# Altium schematic symbol library Treebeard_Passives.SchLib: 5 symbols
Pins are listed as number, name and electrical type; pins without a type are passive.

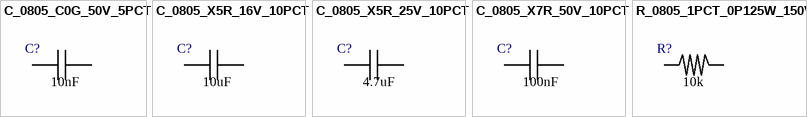
[diagram p0: symbols C_0805_C0G_50V_5PCT to R_0805_1PCT_0P125W_150V]

## C_0805_C0G_50V_5PCT
designator C?, comment Capacitance: 10nF  (hidden comment: 10nF 5% 50V C0G/NP0 0805 MLCC)
Generic 0805 MLCC preset; edit Capacitance only, always with its F (10pF, 1nF, 1uF); Procurement Class: Commodity - freeze LCSC Part # before ordering; Do Not Substitute: No; Component Type: Capacitor; Tolerance: 5%; Voltage Rating: 50V; Dielectric: C0G/NP0; Technology: MLCC; Package: 0805 (2012 Metric)
footprint TB_C_0805_2012M (Treebeard controlled 0805 house footprint)
pins: 1, 2

## C_0805_X5R_16V_10PCT
designator C?, comment Capacitance: 10uF  (hidden comment: 10uF 10% 16V X5R 0805 MLCC)
Generic 0805 MLCC preset; edit Capacitance only, always with its F (10pF, 1nF, 1uF); Procurement Class: Commodity - freeze LCSC Part # before ordering; Do Not Substitute: No; Component Type: Capacitor; Tolerance: 10%; Voltage Rating: 16V; Dielectric: X5R; Technology: MLCC; Package: 0805 (2012 Metric)
footprint TB_C_0805_2012M (Treebeard controlled 0805 house footprint)
pins: 1, 2

## C_0805_X5R_25V_10PCT
designator C?, comment Capacitance: 4.7uF  (hidden comment: 4.7uF 10% 25V X5R 0805 MLCC)
Generic 0805 MLCC preset; edit Capacitance only, always with its F (10pF, 1nF, 1uF); Procurement Class: Commodity - freeze LCSC Part # before ordering; Do Not Substitute: No; Component Type: Capacitor; Tolerance: 10%; Voltage Rating: 25V; Dielectric: X5R; Technology: MLCC; Package: 0805 (2012 Metric)
footprint TB_C_0805_2012M (Treebeard controlled 0805 house footprint)
pins: 1, 2

## C_0805_X7R_50V_10PCT
designator C?, comment Capacitance: 100nF  (hidden comment: 100nF 10% 50V X7R 0805 MLCC)
Generic 0805 MLCC preset; edit Capacitance only, always with its F (10pF, 1nF, 1uF); Procurement Class: Commodity - freeze LCSC Part # before ordering; Do Not Substitute: No; Component Type: Capacitor; Tolerance: 10%; Voltage Rating: 50V; Dielectric: X7R; Technology: MLCC; Package: 0805 (2012 Metric)
footprint TB_C_0805_2012M (Treebeard controlled 0805 house footprint)
pins: 1, 2

## R_0805_1PCT_0P125W_150V
designator R?, comment Resistance: 10k  (hidden comment: 10k ohm 1% 0.125W 150V 100ppm/C 0805 thick-film resistor)
Generic 0805 thick-film resistor; edit Resistance only for normal use; Procurement Class: Commodity - freeze LCSC Part # before ordering; Do Not Substitute: No; Component Type: Resistor; Tolerance: 1%; Power Rating: 0.125W; Voltage Rating: 150V; TCR: 100ppm/C; Technology: Thick Film; Package: 0805 (2012 Metric)
footprint TB_R_0805_2012M (Treebeard controlled 0805 house footprint)
pins: 1, 2